# Altium footprint library new-version2.PcbLib: 88 footprints (part 3 of 6)
Each footprint in its own frame and in the unit in brackets; x right, y up, seen from the top. Pads: shape width x height; smd on the part's side, far side on the other; paste and mask are expansions set on the pad; w line width, h text height; cw(c..) or ccw(c..) is an arc to the next point about the centre after c.
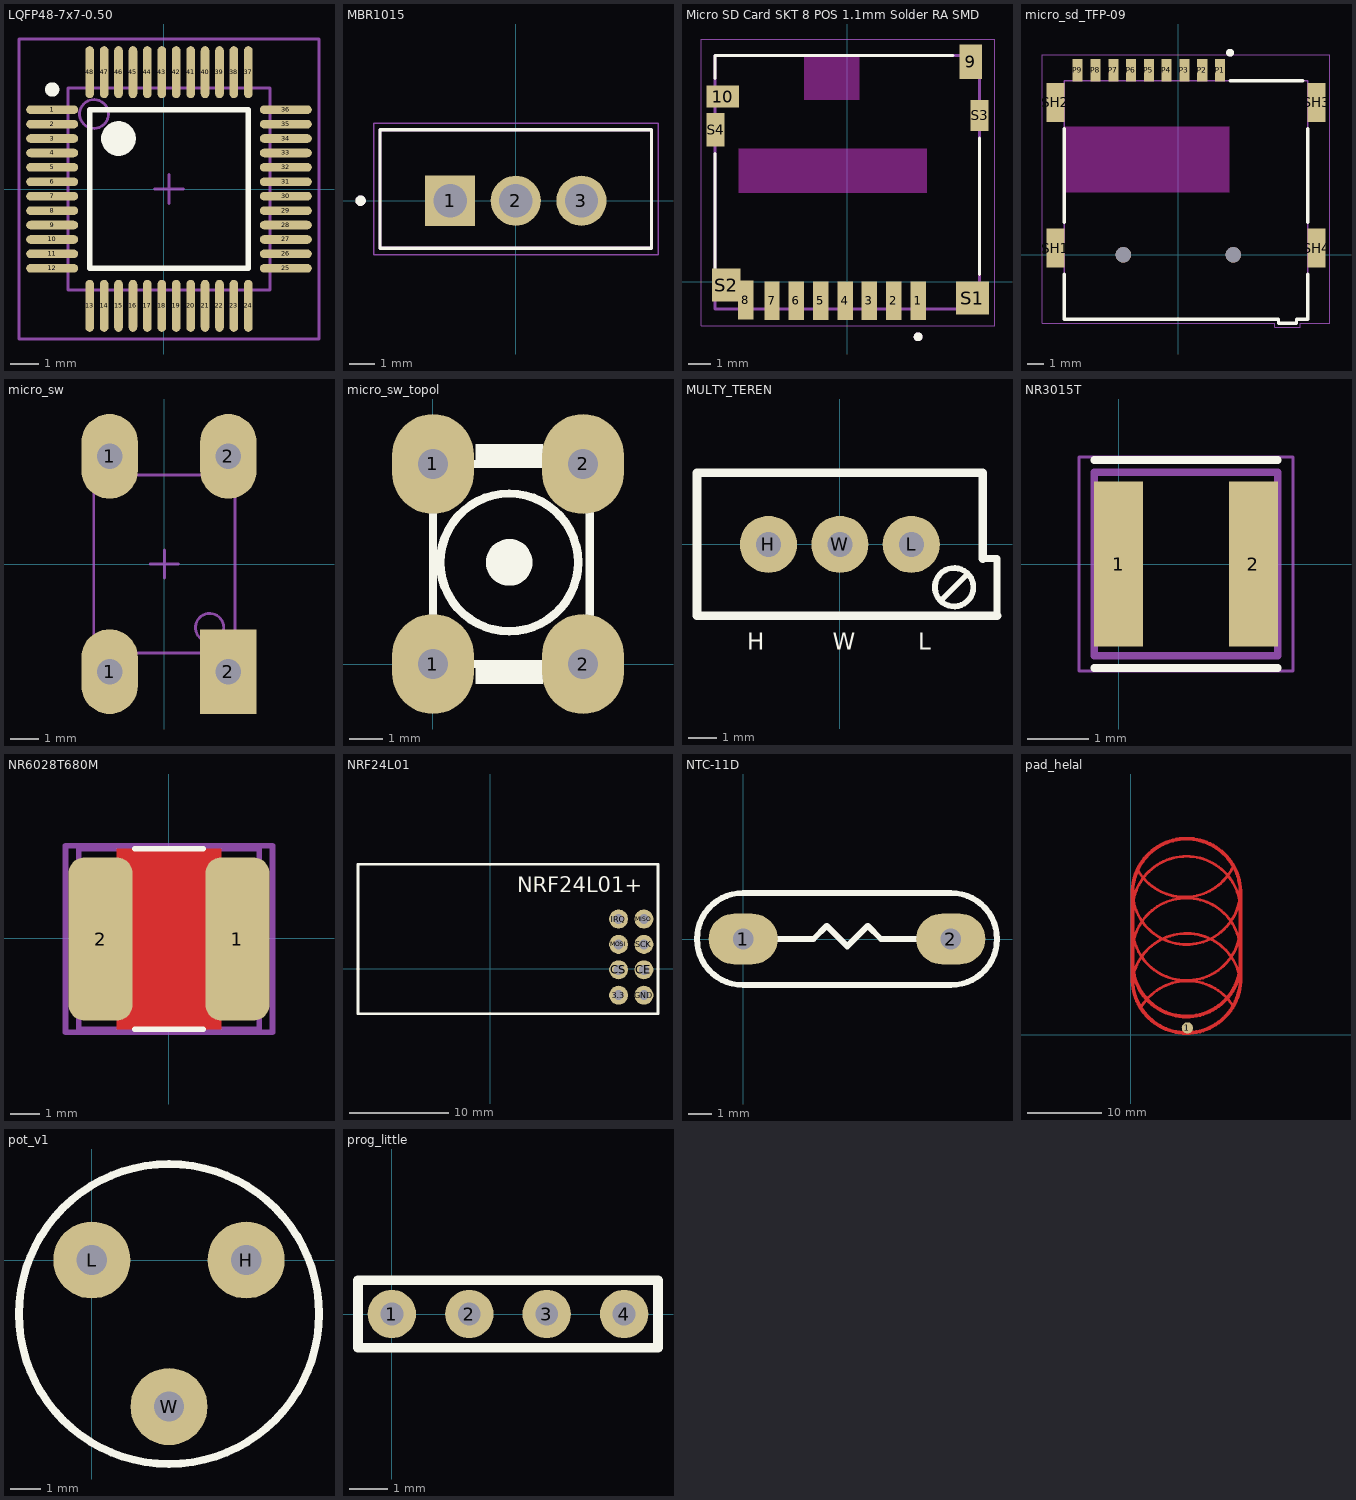
[diagram p2: the footprints below, top view; thin cyan lines are the x and y axes]

## LQFP48-7x7-0.50 [mm]
pads (48):
  oval 1.8x0.3 smd: 1(-3.867,2.757) 2(-3.867,2.257) 3(-3.867,1.757) 4(-3.867,1.257) 5(-3.867,0.757) 6(-3.867,0.257) 7(-3.867,-0.243) 8(-3.867,-0.743) 9(-3.867,-1.243) 10(-3.867,-1.743) 11(-3.867,-2.243) 12(-3.867,-2.743) 25(4.233,-2.743) 26(4.233,-2.243) 27(4.233,-1.743) 28(4.233,-1.243) 29(4.233,-0.743) 30(4.233,-0.243) 31(4.233,0.257) 32(4.233,0.757) 33(4.233,1.257) 34(4.233,1.757) 35(4.233,2.257) 36(4.233,2.757)
  oval 0.3x1.8 smd: 13(-2.567,-4.043) 14(-2.067,-4.043) 15(-1.567,-4.043) 16(-1.067,-4.043) 17(-0.567,-4.043) 18(-0.067,-4.043) 19(0.433,-4.043) 20(0.933,-4.043) 21(1.433,-4.043) 22(1.933,-4.043) 23(2.433,-4.043) 24(2.933,-4.043) 37(2.933,4.057) 38(2.433,4.057) 39(1.933,4.057) 40(1.433,4.057) 41(0.933,4.057) 42(0.433,4.057) 43(-0.067,4.057) 44(-0.567,4.057) 45(-1.067,4.057) 46(-1.567,4.057) 47(-2.067,4.057) 48(-2.567,4.057)
Top Overlay:
  circle w0.25: c-3.867,3.457 r0.125
  circle w0.6: c-1.567,1.757 r0.3
  lines w0.2: -2.567,-2.743 -2.567,2.757 2.933,2.757 2.933,-2.743 -2.567,-2.743
Mechanical 13:
  circle w0.1: c-2.417,2.607 r0.5
  lines w0.1: -3.317,-3.493 -3.317,3.507 3.683,3.507 3.683,-3.493 -3.317,-3.493
Mechanical 15:
  lines w0.1: -0.317,0.007 0.683,0.007 ; 0.183,-0.493 0.183,0.507 ; -5.017,-5.193 -5.017,5.207 5.383,5.207 5.383,-5.193 -5.017,-5.193
3D body "SW3dPS-P-LQFP48-7x7-0.50.STEP": height 1.4, standoff -0.05, extent -4.317,-4.492 4.683,4.508

## MBR1015 [mm]
pads (3):
  rect 1.94x1.94 hole 1.29: 1(-2.54,0.004)
  round 1.94 hole 1.29: 2(0,0.004) 3(2.54,0.004)
Top Overlay:
  circle w0.2: c-6,0.004 r0.1
  lines w0.127: -5.25,-1.838 -5.25,2.752 5.25,2.752 5.25,-1.838 -5.25,-1.838
Mechanical 13:
  circle w0.2: c-6,0.004 r0.1
  lines w0.127: -5.25,-1.838 -5.25,2.752 5.25,2.752 5.25,-1.838 -5.25,-1.838
Mechanical 15:
  lines w0.05: -5.5,-2.088 -5.5,3.002 5.5,3.002 5.5,-2.088 -5.5,-2.088

## Micro SD Card SKT 8 POS 1.1mm Solder RA SMD [mm]
pads (14):
  rect 0.7x1.75 smd: 1(3.19,-0.855) 2(2.09,-0.855) 3(0.99,-0.855) 4(-0.11,-0.855) 5(-1.21,-0.855) 6(-2.31,-0.855) 7(-3.41,-0.855) 8(-4.601,-0.823)
  rect 1x1.55 smd: 9(5.565,9.945)
  rect 1.45x1 smd: 10(-5.635,8.37)
  rect 1.5x1.5 smd: S1(5.64,-0.73)
  rect 1.3x1.5 smd: S2(-5.472,-0.141)
  rect 0.8x1.4 smd: S3(5.965,7.52)
  rect 0.8x1.5 smd: S4(-5.96,6.87)
Top Overlay:
  circle w0.2: c3.19,-2.48 r0.1
  lines w0.127: -5.985,0.34 -5.985,5.8 ; -5.985,9.19 -5.985,10.22 4.77,10.22 ; 5.965,0.34 5.965,6.5
Keep-Out Layer:
  region: 3.59,4.02 -4.91,4.02 -4.91,6.02 3.59,6.02
  region: 0.54,8.22 -1.96,8.22 -1.96,10.22 0.54,10.22
  region: 0.54,8.22 -1.96,8.22 -1.96,10.22 0.54,10.22
  region: 3.59,4.02 -4.91,4.02 -4.91,6.02 3.59,6.02
Mechanical 13:
  circle w0.2: c3.19,-2.48 r0.1
  lines w0.127: -5.985,-1.23 -5.985,10.22 5.965,10.22 5.965,-1.23 -5.985,-1.23
Mechanical 15:
  lines w0.05: -6.61,-1.98 6.64,-1.98 6.64,10.97 -6.61,10.97 -6.61,-1.98
3D body "Micro SD Card SKT 8 POS 1.1mm Solder RA SMD.STEP": height 1.5, standoff 0, extent -6.006,-1.245 6.014,10.405

## micro_sd_TFP-09 [mm]
pads (15):
  rect 0.62x1.4 smd: P1(2.58,11.42) P2(1.48,11.42) P3(0.38,11.42) P4(-0.72,11.42) P5(-1.82,11.42) P6(-2.92,11.42) P7(-4.02,11.42) P8(-5.12,11.42) P9(-6.22,11.42)
  rect 1.1x2.4 smd: SH1(-7.6,0.42) SH2(-7.6,9.42) SH3(8.55,9.42) SH4(8.55,0.42)
  round 0.95 hole 0.95 unplated: ""(-3.4,0) ""(3.4,0)
Top Overlay:
  circle w0.24: c3.2,12.5 r0.12
  lines w0.2: -7.05,-1.2 -7.05,-3.98 6.2,-3.98 6.2,-4.23 7.3,-4.23 7.3,-3.98 8,-3.98 8,-1.2 ; -7.05,2 -7.05,7.8 ; 3.2,10.77 7.7,10.77 ; 8,2 8,7.8
Keep-Out Layer:
  region: 3.15,3.87 -7.05,3.87 -7.05,7.92 3.15,7.92
Mechanical 13:
  circle w0.24: c3.2,12.5 r0.12
  lines w0.1: -7.05,-3.98 6.2,-3.98 6.2,-4.23 7.3,-4.23 7.3,-3.98 8,-3.98 8,10.77 -7.05,10.77 -7.05,-3.98
Mechanical 15:
  lines w0.05: -8.4,-4.23 -8.4,12.37 9.35,12.37 9.35,-4.23 7.55,-4.23 7.55,-4.48 5.95,-4.48 5.95,-4.23 -8.4,-4.23

## micro_sw [mm]
pads (4):
  oval 2x3 hole 0.9: 1(-1.938,-3.81) 1(-1.938,3.81) 2(2.262,3.81)
  rect 2x3 hole 0.9: 2(2.262,-3.81)
Bottom Overlay:
  circle w0.25: c2.57,-3.81 r0.125
  circle w0.6: c1.55,-1.65 r0.3
  lines w0.2: -2.55,-2.65 2.55,-2.65 2.55,-0.635 cw(c2.55,0) 2.55,0.635 2.55,2.65 -2.55,2.65 -2.55,-2.65
Mechanical 13:
  circle w0.1: c1.6,-2.25 r0.5
  lines w0.1: -2.5,-3.15 2.5,-3.15 2.5,3.15 -2.5,3.15 -2.5,-3.15
Mechanical 15:
  lines w0.1: -0.5,0 0.5,0 ; 0,-0.5 0,0.5
3D body: height 5.6, standoff 0, extent -2.5,-3.15 2.5,3.15

## micro_sw_topol [mm]
pads (4):
  oval 2.45x3 hole 0.9: 1(0,0) 1(0,6) 2(4.5,0) 2(4.5,6)
Top Overlay:
  circle w0.254: c2.286,3.048 r2.067
  circle w1: c2.286,3.048 r0.2
  rectangle: 1.27,-0.604 3.302,0
  rectangle: 1.27,6 3.302,6.604
  region: 2.286,3.048
  lines w0.254: 0,0 4.699,0 4.699,6 0,6 0,0

## MULTY_TEREN [mil]
pads (3):
  round 80 hole 35: H(-100,0) L(100,0) W(0,0)
Top Overlay:
  circle w8: c160,-60 r26.93
  lines w8: 143,-77 178,-42
  lines w10: 200,-20 220,-20 220,-100
  lines w12: 200,-20 200,20 200,100 -200,100 -200,-100 200,-100 220,-100
  text "L" at 110,-155 h40
  text "W" at -10,-155 h40
  text "H" at -130,-155 h40

## NR3015T [mm]
pads (2):
  rect 0.8x2.7 smd: 1(0,0) 2(2.2,0)
Top Overlay:
  lines w0.127: -0.4,-1.7 2.6,-1.7 ; -0.4,1.7 2.6,1.7
Mechanical 13:
  lines w0.127: -0.4,-1.5 2.6,-1.5 2.6,1.5 -0.4,1.5 -0.4,-1.5
Mechanical 15:
  lines w0.05: -0.65,-1.75 2.85,-1.75 2.85,1.75 -0.65,1.75 -0.65,-1.75
3D body "step_temp.STEP": height 1.5, standoff 0, extent -0.4,-1.5 2.6,1.5

## NR6028T680M [mm]
pads (2):
  rrect50% 2.2x5.6 smd paste+0 mask+0: 1(2.363,-0.027) 2(-2.337,-0.027)
Top Layer:
  pour cut-out: -1.774,-3.127 -1.774,3.073 1.801,3.073 1.801,-3.127
Top Overlay:
  lines w0.2: -1.162,-3.127 1.188,-3.127 ; -1.162,3.073 1.188,3.073
Top 3D Body:
  lines w0.2: -3.087,-3.127 -3.087,3.073 3.113,3.073 3.113,-3.127 -3.087,-3.127
Top Assembly:
  lines w0.2: -3.537,-3.227 -3.537,3.173 3.563,3.173 3.563,-3.227 -3.537,-3.227
Top Component Center:
  lines w0.1: -0.487,-0.027 0.513,-0.027 ; 0.013,-0.527 0.013,0.473
Top Courtyard:
  lines w0.2: -3.537,-3.227 -3.537,3.173 3.563,3.173 3.563,-3.227 -3.537,-3.227
3D body "Ind_Taiyo_Yuden_NR6028T0R9N_eec.STEP": height 0.25, standoff 0, extent -3.237,-3.227 3.263,3.173

## NRF24L01 [mm]
pads (8):
  round 1.9 hole 1: 3.3(12.827,-2.667) CE(15.367,-0.127) CS(12.827,-0.127) GND(15.367,-2.667) IRQ(12.827,4.953) MISO(15.367,4.953) MOSI(12.827,2.413) SCK(15.367,2.413)
Top Overlay:
  lines w0.254: -13.233,-4.532 -13.233,10.44 16.757,10.44 16.773,10.44 16.773,-4.532 -13.233,-4.532
  text "NRF24L01+" at 2.684,7.616 h1.52

## NTC-11D [mm]
pads (2):
  oval 3x2.2 hole 0.9: 1(0,0) 2(9,0)
Top Overlay:
  lines w0.254: 0,0 2.159,0 3.048,0 3.619,0.572 4.508,-0.318 5.397,0.572 5.969,0 6.841,0 9,0 ; 0,-2 cw(c0,0) 0,2 9,2 cw(c9,0) 9,-2 0,-2

## pad_helal [mil]
pads (1):
  round 60 smd: 1(300,35)
Top Layer:
  lines w10: 10.04,743.05 cw(c295,748.05) 579.92,741.1
  lines w15: 10.04,430 cw(c295,435) 579.92,428.05 ; 10.04,650 cw(c295,655) 579.92,648.05 ; 10.08,576.95 ccw(c295,570) 579.96,575 ; 10.13,766.95 ccw(c295.04,760) 580,765 ; 15,315 cw(c294.53,245.65) 576.54,304.05 ; 40.16,864.14 ccw(c285,1010) 540.91,884.56 ; 52.79,139.87 cw(c300,-1.95) 537.84,155.08
  lines w20: 10,285 10,740 ; 10,300 ccw(c294.92,293.05) 579.87,298.05 ; 10.04,743.05 cw(c295,748.05) 579.92,741.1 ; 10.08,386.95 ccw(c295,380) 579.96,385 ; 580,295 580,740

## PCBComponent_1 [mm]

## PCBComponent_1 - duplicate [mm]

## pot_v1 [mm]
pads (3):
  round 2.54 hole 1: H(5.08,0) L(0,0) W(2.54,-4.826)
Top Overlay:
  circle w0.254: c2.54,-1.778 r4.94

## prog_little [mm]
pads (4):
  round 1.27 hole 0.6: 1(0,0) 2(2.032,0) 3(4.064,0) 4(6.096,0)
Top Overlay:
  lines w0.254: -0.889,-0.889 6.985,-0.889 6.985,0.889 -0.889,0.889 -0.889,-0.889